# EAGLE library part 6220XX21121_62202021121 (library WR-PHD)
WR-PHD 1.27 mm THT Dual Pin Header Article Properties 4 unitless; 8 unitless; 10 unitless; 14 unitless; 16 unitless; 20 unitless; 28 unitless General Information Operating Temperature -40 °C up to +105 °C Compliance Lead free / RoHS Pitch 1.27 mm Durability 50 Cycles Rows Dual Gender Pin Header Type Straight Material Properties Insulator Material PA9T Insulator Flammability Rating UL94 V-0 Contact Material Copper Alloy Contact Plating Gold Contact Type Stamped Certification UL Approval E323964 Packaging Properties Packaging Box Electrical Properties IR 1 A Withstanding Voltage 300 V (AC) Contact Resistance 20 mΩ RISO 500 MΩ <https://www.we-online.com/components/media/o33223v209%20Family_WR-PHD_6220xx21121.jpg> Details see: www.we-online.com/en/components/products/PHD_1_27_THT_DUAL_PIN_HEADER_6220XX21121 <www.we-online.com/en/components/products/PHD_1_27_THT_DUAL_PIN_HEADER_6220XX21121/?utm_source=eagle_model&utm_medium=description_link&utm_campaign=eisos_eagle> Updated by Ella 2024-02-05 2024 (C) Würth Elektronik
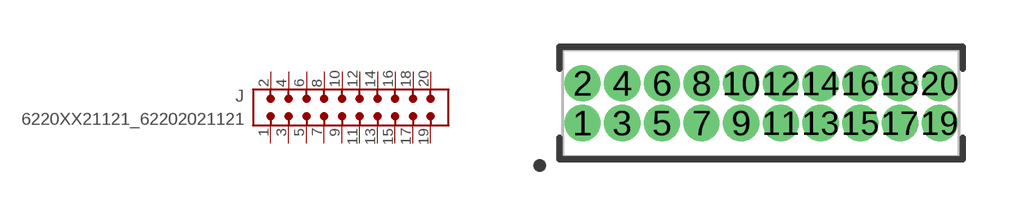
[diagram p393: symbol with the pads of 62202021121; footprint 62202021121]

Designator prefix J

## 6220XX21121_62202021121 (DATASHEET-URL: https://www.we-online.com/redexpert/spec/62202021121?ae; GENDER: Pin Header; IR: 1A; MOUNT: THT; PACKAGING: Box; PART-NUMBER: 62202021121; PINS: 20; PITCH: 1.27 mm; ROWS: Dual; TYPE: Straight; VALUE: 62202021121)  [62202021121]
1  1  pas
2  2  pas
3  3  pas
4  4  pas
5  5  pas
6  6  pas
7  7  pas
8  8  pas
9  9  pas
10  10  pas
11  11  pas
12  12  pas
13  13  pas
14  14  pas
15  15  pas
16  16  pas
17  17  pas
18  18  pas
19  19  pas
20  20  pas

## Footprint 62202021121 (pad centres in mm)
WR-PHD 1.27 mm THT Dual Pin Header, 20 Pins
drill 0.65 pad 1.05: 1 -5.715,-0.635; 2 -5.715,0.635; 3 -4.445,-0.635; 4 -4.445,0.635; 5 -3.175,-0.635; 6 -3.175,0.635; 7 -1.905,-0.635; 8 -1.905,0.635; 9 -0.635,-0.635; 10 -0.635,0.635; 11 0.635,-0.635; 12 0.635,0.635; 13 1.905,-0.635; 14 1.905,0.635; 15 3.175,-0.635; 16 3.175,0.635; 17 4.445,-0.635; 18 4.445,0.635; 19 5.715,-0.635; 20 5.715,0.635